# Altium footprint library DMN2028UFU7.PcbLib: 1 footprints
Each footprint in its own frame and in the unit in brackets; x right, y up, seen from the top. Pads: shape width x height; smd on the part's side, far side on the other; paste and mask are expansions set on the pad; w line width, h text height; cw(c..) or ccw(c..) is an arc to the next point about the centre after c.
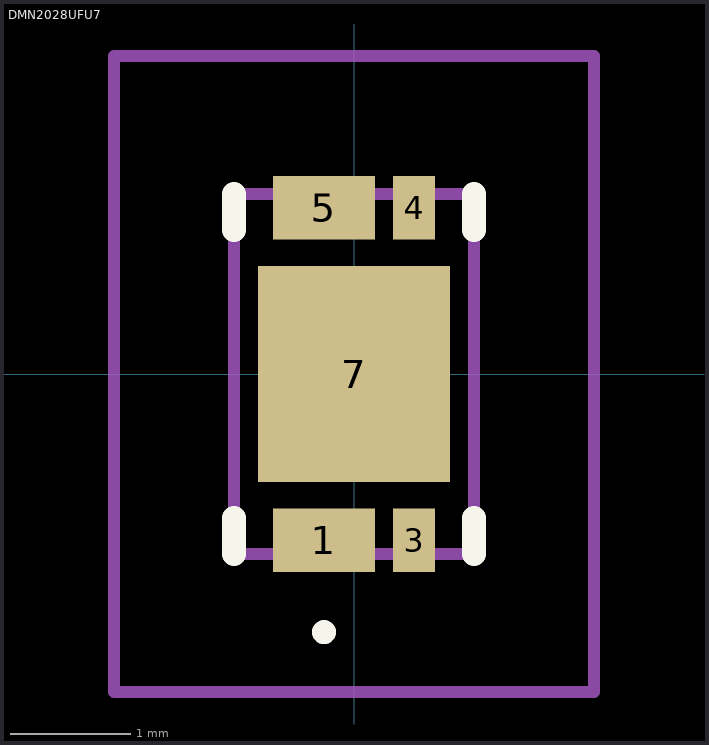
[diagram p0: the footprint, top view; thin cyan lines are the x and y axes]

## DMN2028UFU7 [mm]
pads (5):
  rect 0.85x0.53 smd: 1(-0.25,-1.385) 5(-0.25,1.385)
  rect 0.35x0.53 smd: 3(0.5,-1.385) 4(0.5,1.385)
  rect 1.6x1.8 smd: 7(0,0)
Top Overlay:
  lines w0.1: -0.25,-2.2 -0.25,-2.2 ; -0.25,-2.2 ccw(c-0.25,-2.15) -0.25,-2.1 ; -0.25,-2.2 cw(c-0.25,-2.15) -0.25,-2.1 ; -0.25,-2.1 -0.25,-2.1
  lines w0.2: -1,-1.5 -1,-1.2 ; -1,1.2 -1,1.5 ; 1,-1.5 1,-1.2 ; 1,1.2 1,1.5
Mechanical 15:
  lines w0.1: -1,-1.5 1,-1.5 1,1.5 -1,1.5 -1,-1.5
Mechanical 20:
  lines w0.1: -2,-2.65 2,-2.65 2,2.65 -2,2.65 -2,-2.65